# EAGLE library part RJ11-6P4C (library xport-v92-faxcard)
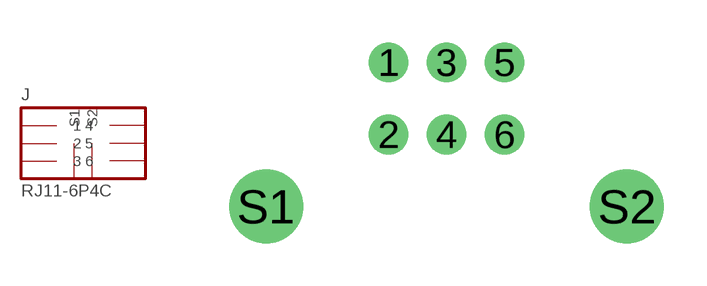
[diagram p3: symbol with the pads of RJ11-6P4C; footprint RJ11-6P4C]

Designator prefix J

## RJ11-6P4C  [RJ11-6P4C]
1  1
2  2
3  3
4  4
5  5
6  6
S1  S1
S2  S2

## Footprint RJ11-6P4C (pad centres in mm)
6P4C modular jack, staggered 2 x 3 contacts, nose over the board edge
drill 0.8 pad 1.4: 1 -2.04,0; 2 -2.04,-2.54; 3 0,0; 4 0,-2.54; 5 2.04,0; 6 2.04,-2.54
drill 1.6 pad 2.6: S1 -6.35,-5.08; S2 6.35,-5.08